# Altium footprint library Modulos.PcbLib: 22 footprints (part 1 of 2)
Each footprint in its own frame and in the unit in brackets; x right, y up, seen from the top. Pads: shape width x height; smd on the part's side, far side on the other; paste and mask are expansions set on the pad; w line width, h text height; cw(c..) or ccw(c..) is an arc to the next point about the centre after c.
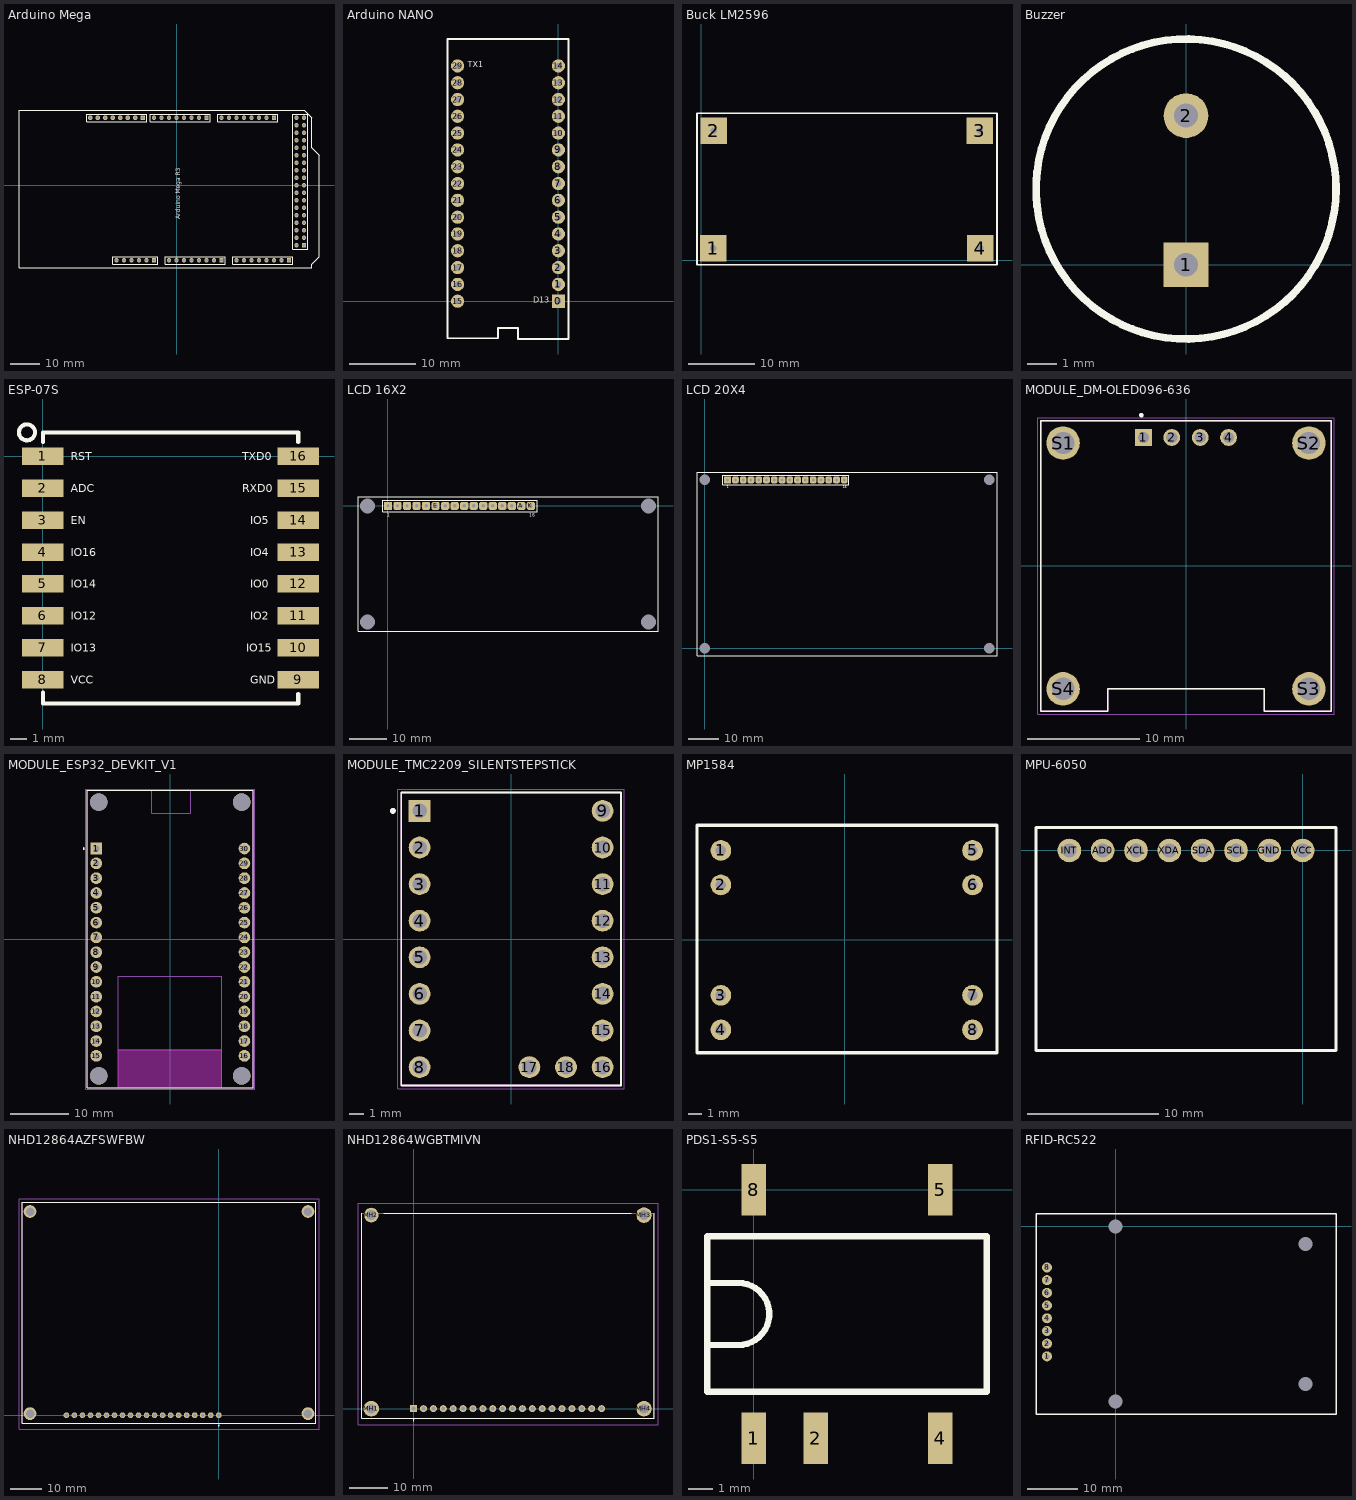
[diagram p0: the footprints below, top view; thin cyan lines are the x and y axes]

## Arduino Mega [mm] "Arduino Mega 2560"
pads (82):
  rect 1.5x1.5 hole 0.9: 0(10.16,22.86) 8(-11.43,22.86) 21(33.02,22.86) 59(-7.62,-25.4) 67(15.24,-25.4) 75(38.1,-25.4) 79(43.18,-20.32)
  round 1.5 hole 0.9: 1(7.62,22.86) 2(5.08,22.86) 3(2.54,22.86) 4(0,22.86) 5(-2.54,22.86) 6(-5.08,22.86) 7(-7.62,22.86) 9(-13.97,22.86) 10(-16.51,22.86) 11(-19.05,22.86) 12(-21.59,22.86) 13(-24.13,22.86) 14(15.24,22.86) 15(17.78,22.86) 16(20.32,22.86) 17(22.86,22.86) 18(25.4,22.86) 19(27.94,22.86) 20(30.48,22.86) 22(40.64,20.32) 23(43.18,20.32) 24(40.64,17.78) 25(43.18,17.78) 26(40.64,15.24) 27(43.18,15.24) 28(40.64,12.7) 29(43.18,12.7) 30(40.64,10.16) 31(43.18,10.16) 32(40.64,7.62) 33(43.18,7.62) 34(40.64,5.08) 35(43.18,5.08) 36(40.64,2.54) 37(43.18,2.54) 38(40.64,0) 39(43.18,0) 40(40.64,-2.54) 41(43.18,-2.54) 42(40.64,-5.08) 43(43.18,-5.08) 44(40.64,-7.62) 45(43.18,-7.62) 46(40.64,-10.16) 47(43.18,-10.16) 48(40.64,-12.7) 49(43.18,-12.7) 50(40.64,-15.24) 51(43.18,-15.24) 52(40.64,-17.78) 53(43.18,-17.78) 54(-20.32,-25.4) 55(-17.78,-25.4) 56(-15.24,-25.4) 57(-12.7,-25.4) 58(-10.16,-25.4) 60(-2.54,-25.4) 61(0,-25.4) 62(2.54,-25.4) 63(5.08,-25.4) 64(7.62,-25.4) 65(10.16,-25.4) 66(12.7,-25.4) 68(20.32,-25.4) 69(22.86,-25.4) 70(25.4,-25.4) 71(27.94,-25.4) 72(30.48,-25.4) 73(33.02,-25.4) 74(35.56,-25.4) 76(-26.67,22.86) 77(-29.21,22.86) 78(40.64,-20.32) 80(43.18,22.86) 81(40.64,22.86)
Top Overlay:
  lines w0.2: -30.48,21.59 -10.16,21.59 -10.16,24.13 -30.48,24.13 -30.48,21.59 ; -21.59,-26.67 -21.59,-24.13 -6.35,-24.13 -6.35,-26.67 -21.59,-26.67 ; -8.89,21.59 11.43,21.59 11.43,24.13 -8.89,24.13 -8.89,21.59 ; -3.81,-26.67 16.51,-26.67 16.51,-24.13 -3.81,-24.13 -3.81,-26.67 ; 13.97,21.59 13.97,24.13 34.29,24.13 34.29,21.59 13.97,21.59 ; 19.05,-26.67 39.37,-26.67 39.37,-24.13 19.05,-24.13 19.05,-26.67 ; 39.37,-21.59 44.45,-21.59 44.45,24.13 39.37,24.13 39.37,-21.59
  lines w0.254: 45.72,12.69 48.26,10.15 48.26,-24.13 45.72,-26.67 45.72,-27.94 -51.7,-27.94 -53.34,-27.94 -53.34,-26.3 -53.34,25.4 43.18,25.4 45.72,22.86 45.72,12.7
  text "Arduino Mega R3" at 1.27,-11.43 h1.52
3D body "ArduinoMega.STEP": height 0.16, standoff -12.8, extent -59.69,-27.94 48.26,25.476

## Arduino NANO [mm]
pads (30):
  rect 2x2 hole 0.9: 0(0,0)
  round 2 hole 0.9: 1(0,2.54) 2(0,5.08) 3(0,7.62) 4(0,10.16) 5(0,12.7) 6(0,15.24) 7(0,17.78) 8(0,20.32) 9(0,22.86) 10(0,25.4) 11(0,27.94) 12(0,30.48) 13(0,33.02) 14(0,35.56) 15(-15.24,0) 16(-15.24,2.54) 17(-15.24,5.08) 18(-15.24,7.62) 19(-15.24,10.16) 20(-15.24,12.7) 21(-15.24,15.24) 22(-15.24,17.78) 23(-15.24,20.32) 24(-15.24,22.86) 25(-15.24,25.4) 26(-15.24,27.94) 27(-15.24,30.48) 28(-15.24,33.02) 29(-15.24,35.56)
Top Overlay:
  lines w0.254: -16.764,-5.588 -16.764,39.624 1.524,39.624 1.524,-5.715 -6.096,-5.715 -6.096,-4.064 -7.62,-4.064 -9.144,-4.064 -9.144,-5.588 -16.764,-5.588
  text "TX1" at -13.716,35.052 h1.52
  text "D13" at -3.81,-0.508 h1.52
3D body "User Library-ARDUINO_NANO_V3.STEP": height 16.1, standoff -2.5, extent -16.62,-5.62 1.38,39.38

## Buck LM2596 [mm]
pads (4):
  rect 4x4 hole 1: 1(1.803,1.803) 2(1.854,19.456) 3(41.808,19.456) 4(41.834,1.778)
Top Overlay:
  lines w0.254: -0.66,-0.66 44.374,-0.66 44.374,22.047 -0.66,22.047 -0.66,-0.66
3D body "LM2596_Buck_Converter.stp": height 13, standoff -1, extent 0.344,0 43.344,21.15

## Buzzer [mm] "AI-1027-TWT-5V-2-R"
pads (2):
  rect 1.5x1.5 hole 0.8: 1(0,0)
  round 1.5 hole 0.8: 2(0,5)
Top Overlay:
  circle w0.254: c0,2.54 r5.029
3D body "Buzzer_TDK_pitch_5.stp": height 9, standoff -2, extent -6.104,-3.56 6.096,8.64

## ESP-07S [mm] "ESP-07S WIFI MODULE"
pads (16):
  rect 2.6x1.1 smd: 1(0,0) 2(0,-2) 3(0,-4) 4(0,-6) 5(0,-8) 6(0,-10) 7(0,-12) 8(0,-14) 9(16,-14) 10(16,-12) 11(16,-10) 12(16,-8) 13(16,-6) 14(16,-4) 15(16,-2) 16(16,0)
Top Overlay:
  circle w0.254: c-1,1.5 r0.5
  lines w0.254: 0,-14.8 0,-15.5 16,-15.5 16,-14.9 ; 0,0.9 0,1.5 16,1.5 16,0.9
  text "TXD0" at 12.5,-0.25 h0.5
  text "RXD0" at 12.5,-2.25 h0.5
  text "IO5" at 13,-4.25 h0.5
  text "IO4" at 13,-6.25 h0.5
  text "IO0" at 13,-8.25 h0.5
  text "IO2" at 13,-10.25 h0.5
  text "IO15" at 12.75,-12.25 h0.5
  text "GND" at 13,-14.25 h0.5
  text "VCC" at 1.75,-14.25 h0.5
  text "IO13" at 1.75,-12.25 h0.5
  text "IO12" at 1.75,-10.25 h0.5
  text "IO14" at 1.75,-8.25 h0.5
  text "IO16" at 1.75,-6.25 h0.5
  text "EN" at 1.75,-4.25 h0.5
  text "ADC" at 1.75,-2.25 h0.5
  text "RST" at 1.75,-0.25 h0.5

## LCD 16X2 [mm]
pads (20):
  rrect50% 2.2x2.2 hole 0.9 unplated: A(35.56,0) D0(15.24,0) D1(17.78,0) D2(20.32,0) D3(22.86,0) D4(25.4,0) D5(27.94,0) D6(30.48,0) D7(33.02,0) E(12.7,0) K(38.1,0) RS(7.62,0) RW(10.16,0) VDD(2.54,0) VO(5.08,0)
  rect 2.2x2.2 hole 0.9 unplated: VSS(0,0)
  round 2 hole 4 unplated: ""(-5.5,-31) ""(-5.5,0) ""(69.5,-31) ""(69.5,0)
Top Overlay:
  lines w0.254: -8,-33.5 72,-33.5 72,2.5 -8,2.5 -8,-33.5 ; -1.414,-1.612 39.734,-1.612 39.734,1.436 -1.414,1.436 -1.414,-1.612
  text "16" at 37.702,-2.882 h0.89
  text "1" at -0.144,-2.882 h0.89
3D body "User Library-Header_Male_10Pin.STEP": height 10, standoff -1.54, extent -1.27,-1.245 24.13,1.245
3D body "User Library-Header_Male_6Pin.STEP": height 10, standoff -1.54, extent 24.13,-1.245 39.37,1.245
3D body "User Library-LCD 16x2 JHD162A.step": height 17.8, standoff 4.65, extent -8.021,-33.613 71.979,2.388

## LCD 20X4 [mm]
pads (20):
  rrect50% 2.2x2.2 hole 0.9 unplated: A(43.06,55) D0(22.74,55) D1(25.28,55) D2(27.82,55) D3(30.36,55) D4(32.9,55) D5(35.44,55) D6(37.98,55) D7(40.52,55) E(20.2,55) K(45.6,55) RS(15.12,55) RW(17.66,55) VDD(10.04,55) VO(12.58,55)
  rect 2.2x2.2 hole 0.9 unplated: VSS(7.5,55)
  round 1.524 hole 3.4 unplated: ""(0,0) ""(0,55) ""(93,0) ""(93,55)
Top Overlay:
  lines w0.254: -2.5,-2.46 -2.5,57.54 95.5,57.54 95.5,-2.46 -2.5,-2.46 ; 5.976,53.476 5.976,56.524 47.124,56.524 47.124,53.476 5.976,53.476
  text "1" at 7.246,52.206 h0.89
  text "16" at 45.092,52.206 h0.89
3D body "ERM2004-2_3D.stp": height 18.97, standoff 4.97, extent -2.511,-2.46 95.489,57.54
3D body "User Library-Header_Male_8Pin.STEP": height 10, standoff -1.54, extent 6.23,53.755 26.55,56.245
3D body "User Library-Header_Male_8Pin.STEP": height 10, standoff -1.54, extent 26.55,53.755 46.87,56.245

## MODULE_DM-OLED096-636 [mm]
height 11.3
pads (8):
  rect 1.508x1.508 / inner round 1.508 / far side rect 1.508x1.508 hole 1: 1(-3.81,11.5)
  round 1.508 hole 1: 2(-1.27,11.5) 3(1.27,11.5) 4(3.81,11.5)
  round 3 hole 2: S1(-11,11) S2(11,11) S3(11,-11) S4(-11,-11)
Top Overlay:
  circle w0.2: c-4,13.5 r0.1
  lines w0.127: -13,-13 -7,-13 -7,-11 7,-11 7,-13 13,-13 13,13 -13,13 -13,-13
Mechanical 13:
  circle w0.2: c-4,13.5 r0.1
  lines w0.127: -13,-13 -7,-13 -7,-11 7,-11 7,-13 13,-13 13,13 -13,13 -13,-13
Mechanical 15:
  lines w0.05: -13.25,-13.25 13.25,-13.25 13.25,13.25 -13.25,13.25 -13.25,-13.25
3D body "step_temp.STEP": height 5.66, standoff -5.64, extent -13,-13 13,13

## MODULE_ESP32_DEVKIT_V1 [mm]
height 6.8
pads (34):
  rect 2x2 / inner round 2 / far side rect 2x2 hole 1.02: 1(-12.7,15.515)
  round 2 hole 1.02: 2(-12.7,12.975) 3(-12.7,10.435) 4(-12.7,7.895) 5(-12.7,5.355) 6(-12.7,2.815) 7(-12.7,0.275) 8(-12.7,-2.265) 9(-12.7,-4.805) 10(-12.7,-7.345) 11(-12.7,-9.885) 12(-12.7,-12.425) 13(-12.7,-14.965) 14(-12.7,-17.505) 15(-12.7,-20.045) 16(12.7,-20.045) 17(12.7,-17.505) 18(12.7,-14.965) 19(12.7,-12.425) 20(12.7,-9.885) 21(12.7,-7.345) 22(12.7,-4.805) 23(12.7,-2.265) 24(12.7,0.275) 25(12.7,2.815) 26(12.7,5.355) 27(12.7,7.895) 28(12.7,10.435) 29(12.7,12.975) 30(12.7,15.515)
  round 3 hole 3 unplated: ""(-12.28,-23.475) ""(-12.28,23.475) ""(12.23,-23.475) ""(12.23,23.475)
Top Overlay:
  circle w0.2: c-14.85,15.515 r0.1
  lines w0.127: -14.28,-25.475 14.23,-25.475 ; -14.28,-25.475 -14.28,25.475 ; -14.28,-25.475 -14.28,25.475 ; -14.28,-25.475 -8.91,-25.475 8.78,-25.475 14.23,-25.475 ; -14.28,25.475 14.23,25.475 ; -14.28,25.475 -3.211,25.475 3.5,25.475 14.23,25.475 ; 14.23,-25.475 14.23,25.475 ; 14.23,-25.475 14.23,25.475
Keep-Out Layer:
  region: 8.78,-25.475 -8.91,-25.475 -8.91,-18.985 8.78,-18.985
  region: 8.78,-25.475 -8.91,-25.475 -8.91,-18.985 8.78,-18.985
Mechanical 13:
  circle w0.2: c-14.85,15.515 r0.1
  lines w0.127: -8.91,-25.475 -14.28,-25.475 -14.28,25.475 -3.211,25.475 ; -8.91,-25.475 8.78,-25.475 ; -8.91,-25.475 -8.91,-18.985 ; -8.91,-18.985 -8.91,-6.355 8.78,-6.355 8.78,-18.985 ; -8.91,-18.985 8.78,-18.985 ; -3.211,25.475 3.5,25.475 ; -3.211,25.475 -3.211,21.585 3.5,21.585 3.5,25.475 ; 3.5,25.475 14.23,25.475 14.23,-25.475 8.78,-25.475 ; 8.78,-25.475 8.78,-18.985
Mechanical 15:
  lines w0.05: -14.53,-25.725 -14.53,25.725 14.48,25.725 14.48,-25.725 -14.53,-25.725
3D body "step_temp.STEP": height 7.05, standoff -6, extent -14.1,-25.9 14.1,26.55

## MODULE_TMC2209_SILENTSTEPSTICK [mm]
pads (18):
  rect 1.508x1.508 / inner round 1.508 / far side rect 1.508x1.508 hole 1: 1(-6.35,8.89)
  round 1.508 hole 1: 2(-6.35,6.35) 3(-6.35,3.81) 4(-6.35,1.27) 5(-6.35,-1.27) 6(-6.35,-3.81) 7(-6.35,-6.35) 8(-6.35,-8.89) 9(6.35,8.89) 10(6.35,6.35) 11(6.35,3.81) 12(6.35,1.27) 13(6.35,-1.27) 14(6.35,-3.81) 15(6.35,-6.35) 16(6.35,-8.89) 17(1.27,-8.89) 18(3.81,-8.89)
Top Overlay:
  circle w0.2: c-8.2,8.89 r0.1
  lines w0.127: -7.62,-10.16 -7.62,10.16 7.62,10.16 7.62,-10.16 -7.62,-10.16
Mechanical 13:
  circle w0.2: c-8.2,8.89 r0.1
  lines w0.127: -7.62,-10.16 -7.62,10.16 7.62,10.16 7.62,-10.16 -7.62,-10.16
Mechanical 15:
  lines w0.05: -7.87,-10.41 -7.87,10.41 7.87,10.41 7.87,-10.41 -7.87,-10.41
3D body "TMC2209.STEP": height 20.3, standoff -6.1, extent -7.62,-10.16 7.62,10.16

## MP1584 [mil] "MP1584 DC to DC Converter and Switching Regulator Chip 0.8VDC to 18VDC Output Development Tool"
pads (8):
  round 60 hole 30: 1(-359.92,259.45) 2(-359.92,159.45) 3(-359.92,-160.55) 4(-359.92,-260.55) 5(370.08,259.45) 6(370.08,159.45) 7(370.08,-160.55) 8(370.08,-260.55)
Top Overlay:
  lines w10: -429.13,-327.32 440.94,-327.32 440.94,332.68 -429.13,332.68 -429.13,-327.32

## MPU-6050 [mm]
pads (8):
  round 1.8 hole 1.1: AD0(-15.24,0) GND(-2.54,0) INT(-17.78,0) SCL(-5.08,0) SDA(-7.62,0) VCC(0,0) XCL(-12.7,0) XDA(-10.16,0)
Top Overlay:
  lines w0.254: -20.32,-15.24 2.54,-15.24 2.54,1.75 -20.32,1.75 -20.32,-15.24
3D body "MPU 6050 IMU.STEP": height 6.44, standoff -4.73, extent -19.304,-14.575 1.804,1.3

## NHD12864AZFSWFBW [mm]
pads (24):
  round 1.8 hole 1.2: 1(0,0) 2(-2.54,0) 3(-5.08,0) 4(-7.62,0) 5(-10.16,0) 6(-12.7,0) 7(-15.24,0) 8(-17.78,0) 9(-20.32,0) 10(-22.86,0) 11(-25.4,0) 12(-27.94,0) 13(-30.48,0) 14(-33.02,0) 15(-35.56,0) 16(-38.1,0) 17(-40.64,0) 18(-43.18,0) 19(-45.72,0) 20(-48.26,0)
  round 4.05 hole 2.7: MH1(28.24,0.5) MH2(-59.76,0.5) MH3(-59.76,64.5) MH4(28.24,64.5)
Top Overlay:
  lines w0.2: 0,-3.4 cw(c0,-3.3) 0,-3.2 ; 0,-3.4 ccw(c0,-3.3) 0,-3.2 ; 0,-3.4 cw(c0,-3.3) 0,-3.2 ; -62.26,-2.5 30.74,-2.5 30.74,67.5 -62.26,67.5 -62.26,-2.5
Mechanical 15:
  lines w0.1: -62.26,-2.5 30.74,-2.5 30.74,67.5 -62.26,67.5 -62.26,-2.5
Mechanical 20:
  lines w0.1: -63.26,-4.4 31.74,-4.4 31.74,68.5 -63.26,68.5 -63.26,-4.4

## NHD12864WGBTMIVN [mm]
pads (24):
  rect 1.8x1.8 hole 1: 1(0,0)
  round 1.8 hole 1: 2(2.54,0) 3(5.08,0) 4(7.62,0) 5(10.16,0) 6(12.7,0) 7(15.24,0) 8(17.78,0) 9(20.32,0) 10(22.86,0) 11(25.4,0) 12(27.94,0) 13(30.48,0) 14(33.02,0) 15(35.56,0) 16(38.1,0) 17(40.64,0) 18(43.18,0) 19(45.72,0) 20(48.26,0)
  round 4 hole 2.5: MH1(-10.87,0) MH3(59.13,49.7) MH4(59.13,0)
  round 3.75 hole 2.5: MH2(-10.87,49.7)
Top Overlay:
  lines w0.2: -13.37,50.2 -13.37,-2.5 61.73,-2.5 61.73,7.62 61.73,50.2 ; -7.62,50.2 55.88,50.2 ; -0.1,-3 cw(c0,-3) 0.1,-3 cw(c0,-3) -0.1,-3
Mechanical 15:
  lines w0.1: -13.37,-2.5 -13.37,50.2 61.63,50.2 61.63,-2.5 -13.37,-2.5
Mechanical 20:
  lines w0.1: -14.27,-4.1 -14.27,52.7 62.73,52.7 62.73,-4.1 -14.27,-4.1

## PDS1-S5-S5 [mm]
pads (5):
  rect 1x2.1 smd: 1(0,-10.16) 2(2.54,-10.16) 4(7.62,-10.16) 5(7.62,0) 8(0,0)
Top Overlay:
  lines w0.254: -1.905,-6.35 -0.635,-6.35 ccw(c-0.635,-5.08) -0.635,-3.81 -1.905,-3.81 ; -1.905,-8.255 9.525,-8.255 9.525,-1.905 -1.905,-1.905 -1.905,-8.255
3D body "User Library-PDS1-S5-S5-M-TR.STEP": height 7.1, standoff 0.03, extent -2.54,-10.688 10.16,0.528

## RFID-RC522 [mm]
pads (12):
  round 2 hole 1: 1(-13.7,-25.98) 2(-13.7,-23.44) 3(-13.7,-20.9) 4(-13.7,-18.36) 5(-13.7,-15.82) 6(-13.7,-13.28) 7(-13.7,-10.74) 8(-13.7,-8.2)
  round 2 hole 2.8: ""(0,-34.98) ""(0,0) ""(38,-31.48) ""(38,-3.5)
Top Overlay:
  lines w0.254: -15.91,-37.512 44.085,-37.512 44.085,2.493 -15.91,2.493 -15.91,-37.512
3D body "RFID.STEP": height 7.74, standoff -3.8, extent -15.91,-37.522 44.09,2.478